# Altium schematic symbol library C0805_Murata GRM21BR71H105KA12L.SCHLIB: 1 symbol
Pins are listed as number, name and electrical type; pins without a type are passive.

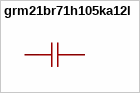
[diagram p0: symbol grm21br71h105ka12l]

## grm21br71h105ka12l
designator C??  (value not drawn)
容值:1uF;精度:±10%;额定电压:50V;温度系数:X7R;; Manufacturer: muRata(村田); AddInBom: yes; ModelId: 1ba041120af144c991958decab20d241; ModelName: C0805_L2.0-W1.3-H1.3; ModelTransform: 78.74,51.181,0,0,0,0,0,0.0005,0; Value: 1uF; Tolerance: ±10%; Voltage Rating: 50V; Temperature Coefficient: X7R; Symbol: GRM21BR71H105KA12L; LCSC Part Name: 1uF ±10% 50V; SupplierPart: C77083; ManufacturerPart: GRM21BR71H105KA12L; Supplier Footprint: 0805; JLCPCB Part Class: Extended Part; Datasheet: https://item.szlcsc.com/datasheet/GRM21BR71H105KA12L/78210.html; Supplier: LCSC; ConvertToPcb: yes; FootprintName: C0805
footprint C0805
pins: 1, 2